# Altium footprint library SLA-12VDC-SL-C.PcbLib: 1 footprints
Each footprint in its own frame and in the unit in brackets; x right, y up, seen from the top. Pads: shape width x height; smd on the part's side, far side on the other; paste and mask are expansions set on the pad; w line width, h text height; cw(c..) or ccw(c..) is an arc to the next point about the centre after c.
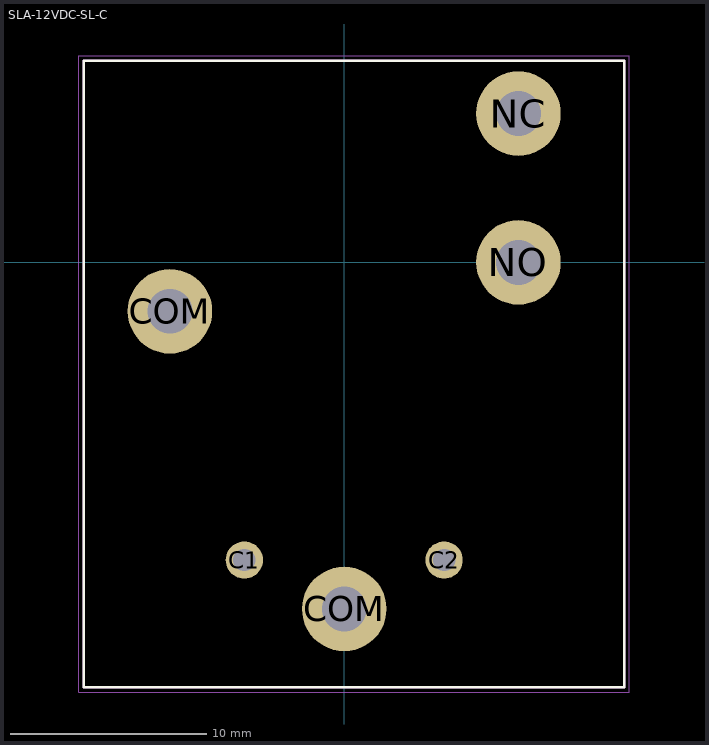
[diagram p0: the footprint, top view; thin cyan lines are the x and y axes]

## SLA-12VDC-SL-C [mil] "SLA-12VDC-SL-C"
height 803.15
pads (6):
  round 75 hole 45: C1(-200.79,-598.43) C2(200.79,-598.43)
  round 170 hole 90: COM(-350.39,-98.43) COM(0,-696.85) NC(350.39,299.21) NO(350.39,0)
Top Overlay:
  lines w5: -523.62,-854.33 -523.62,405.51 562.99,405.51 562.99,-854.33 -523.62,-854.33
Mechanical 13:
  lines w5: -523.62,-854.33 -523.62,405.51 562.99,405.51 562.99,-854.33 -523.62,-854.33
Mechanical 15:
  lines w1.97: -533.46,-864.17 -533.46,415.35 572.83,415.35 572.83,-864.17 -533.46,-864.17
3D body "step_temp.STEP": height 803.15, standoff -125.98, extent -523.62,-854.33 562.99,405.51